# EAGLE library part CA3080 (library madhu)
2MHz, Operational Transconductance Amplifier (OTA)
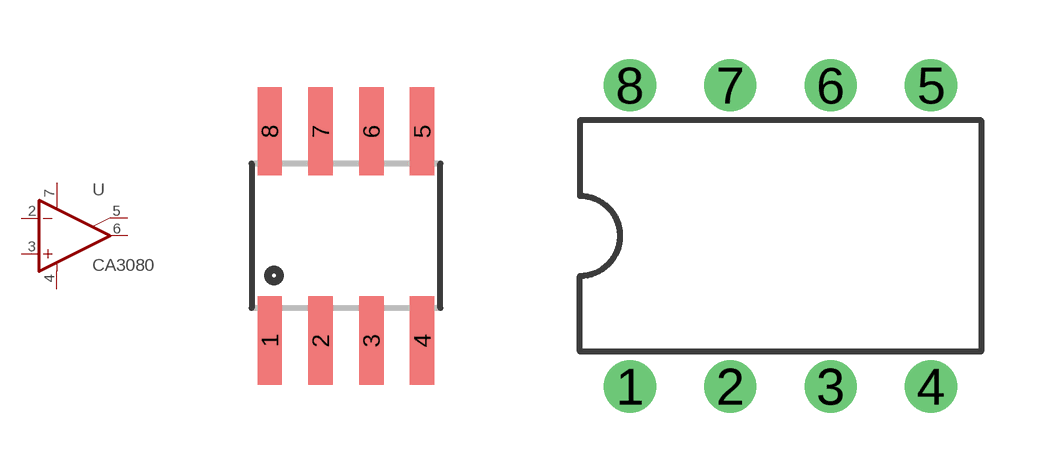
[diagram p16: symbol with the pads of SOIC-8; footprints SOIC-8, DIL08]

Designator prefix U

## CA3080M  [SOIC-8]
2  -IN  in
3  +IN  in
4  V-  pwr
5  IABC  pas
6  OUT  out
7  V+  pwr

## CA3080E  [DIL08]
Pads as for SOIC-8

## Footprint SOIC-8 (pad centres in mm)
Small Outline Package Fits JEDEC packages (narrow SOIC-8)
smd 0.61 x 2.21: 1 -1.905,-2.616; 2 -0.635,-2.616; 3 0.635,-2.616; 4 1.905,-2.616; 5 1.905,2.616; 6 0.635,2.616; 7 -0.635,2.616; 8 -1.905,2.616

## Footprint DIL08 (pad centres in mm)
Dual In Line Package
drill 0.813 pad 1.27: 1 -3.81,-3.81; 2 -1.27,-3.81; 3 1.27,-3.81; 4 3.81,-3.81; 5 3.81,3.81; 6 1.27,3.81; 7 -1.27,3.81; 8 -3.81,3.81